# Altium footprint library Regulator$.PcbLib: 106 footprints (part 3 of 7)
Each footprint in its own frame and in the unit in brackets; x right, y up, seen from the top. Pads: shape width x height; smd on the part's side, far side on the other; paste and mask are expansions set on the pad; w line width, h text height; cw(c..) or ccw(c..) is an arc to the next point about the centre after c.
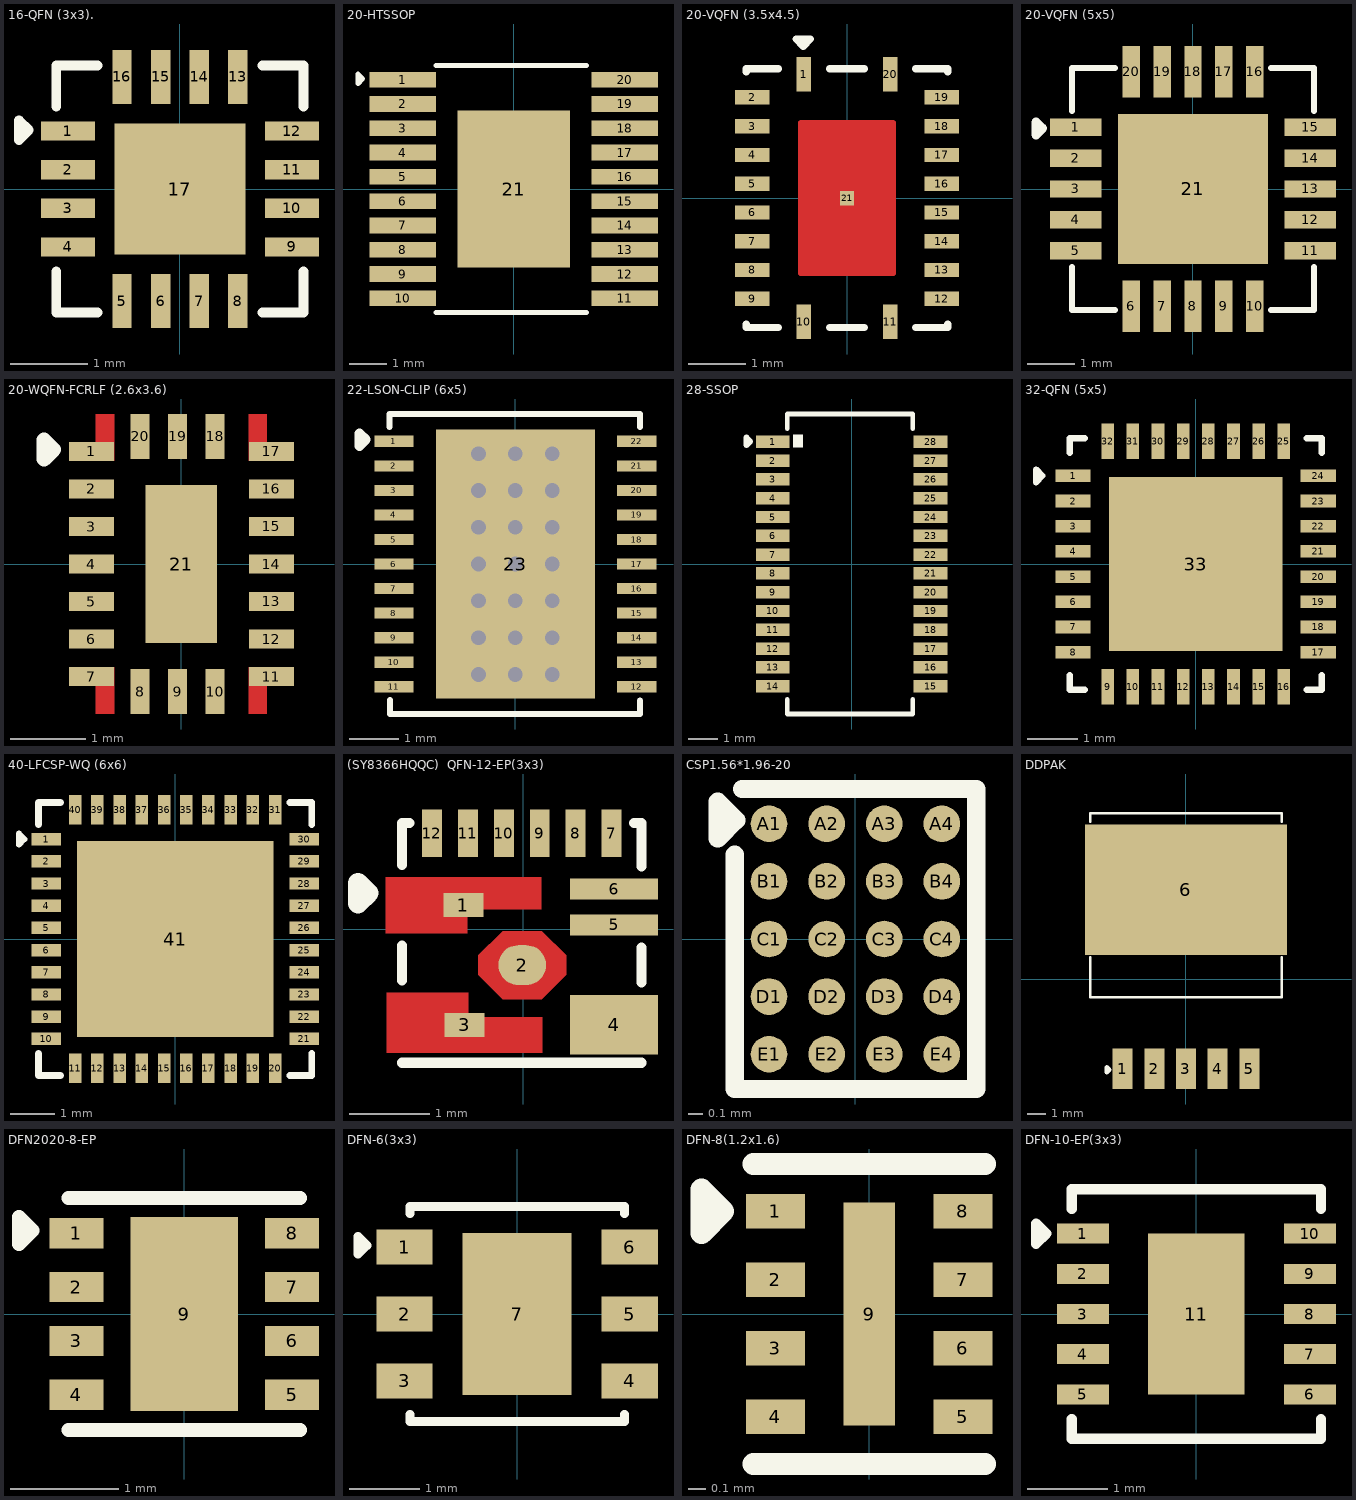
[diagram p2: the footprints below, top view; thin cyan lines are the x and y axes]

## 16-QFN (3x3). [mm]
pads (17):
  rect 0.7x0.25 smd: 1(-1.45,0.75) 2(-1.45,0.25) 3(-1.45,-0.25) 4(-1.45,-0.75) 9(1.45,-0.75) 10(1.45,-0.25) 11(1.45,0.25) 12(1.45,0.75)
  rect 0.25x0.7 smd: 5(-0.75,-1.45) 6(-0.25,-1.45) 7(0.25,-1.45) 8(0.75,-1.45) 13(0.75,1.45) 14(0.25,1.45) 15(-0.25,1.45) 16(-0.75,1.45)
  rect 1.7x1.7 smd: 17(0,0)
Top Overlay:
  lines w0.127: -1.6,-1.067 -1.6,-1.6 -1.067,-1.6 ; -1.6,1.067 -1.6,1.6 -1.067,1.6 ; 1.067,-1.6 1.6,-1.6 1.6,-1.067 ; 1.067,1.6 1.6,1.6 1.6,1.067 ; -2.083,0.635 -1.956,0.762 -2.083,0.889 -2.083,0.635
3D body "QFN-16_3X3_MNS.step": height 0.99, standoff 0, extent -1.549,-1.549 1.549,1.549

## 20-HTSSOP [mm]
pads (21):
  rect 1.78x0.42 smd: 1(-2.97,2.925) 2(-2.97,2.275) 3(-2.97,1.625) 4(-2.97,0.975) 5(-2.97,0.325) 6(-2.97,-0.325) 7(-2.97,-0.975) 8(-2.97,-1.625) 9(-2.97,-2.275) 10(-2.97,-2.925) 11(2.97,-2.925) 12(2.97,-2.275) 13(2.97,-1.625) 14(2.97,-0.975) 15(2.97,-0.325) 16(2.97,0.325) 17(2.97,0.975) 18(2.97,1.625) 19(2.97,2.275) 20(2.97,2.925)
  rect 3x4.2 smd: 21(0,0)
Top Overlay:
  lines w0.127: -2.083,-3.302 1.956,-3.302 ; -2.083,3.302 1.956,3.302 ; -4.166,2.819 -4.166,3.073 -4.039,2.946 -4.166,2.819
3D body "LM25118Q1MHX_NOPB.STEP": height 1.1, standoff 0, extent -3.2,-3.25 3.2,3.25

## 20-VQFN (3.5x4.5) [mm]
pads (21):
  rect 0.25x0.6 smd: 1(-0.75,2.15) 10(-0.75,-2.15) 11(0.75,-2.15) 20(0.75,2.15)
  rect 0.6x0.25 smd: 2(-1.65,1.75) 3(-1.65,1.25) 4(-1.65,0.75) 5(-1.65,0.25) 6(-1.65,-0.25) 7(-1.65,-0.75) 8(-1.65,-1.25) 9(-1.65,-1.75) 12(1.65,-1.75) 13(1.65,-1.25) 14(1.65,-0.75) 15(1.65,-0.25) 16(1.65,0.25) 17(1.65,0.75) 18(1.65,1.25) 19(1.65,1.75)
  rect 0.25x0.25 smd paste-1 mask+0: 21(0,0)
Top Layer:
  region: 0.808,1.349 0.81,1.349 0.813,1.348 0.815,1.348 0.818,1.347 0.82,1.346 0.823,1.345 0.825,1.343 0.827,1.342 0.829,1.34 0.831,1.339 0.833,1.337 0.835,1.335 0.837,1.333 0.839,1.331 0.84,1.329 0.842,1.327 0.843,1.325 0.845,1.323 0.846,1.32 0.847,1.318 0.848,1.315 0.848,1.313 0.849,1.31 0.849,1.308 0.85,1.305 0.85,1.303 0.85,1.3 0.85,-1.3 0.85,-1.303 0.85,-1.305 0.849,-1.308 0.849,-1.31 0.848,-1.313 0.848,-1.315 0.847,-1.318 0.846,-1.32 0.845,-1.323 0.843,-1.325 0.842,-1.327 0.84,-1.329 0.839,-1.331 0.837,-1.333 0.835,-1.335 0.833,-1.337 0.831,-1.339 0.829,-1.34 0.827,-1.342 0.825,-1.343 0.823,-1.345 0.82,-1.346 0.818,-1.347 0.815,-1.348 0.813,-1.348 0.81,-1.349 0.808,-1.349 0.805,-1.35 -0.805,-1.35 -0.808,-1.349 -0.81,-1.349 -0.813,-1.348 -0.815,-1.348 -0.818,-1.347 -0.82,-1.346 -0.823,-1.345 -0.825,-1.343 -0.827,-1.342 -0.829,-1.34 -0.831,-1.339 -0.833,-1.337 -0.835,-1.335 -0.837,-1.333 -0.839,-1.331 -0.84,-1.329 -0.842,-1.327 -0.843,-1.325 -0.845,-1.323 -0.846,-1.32 -0.847,-1.318 -0.848,-1.315 -0.848,-1.313 -0.849,-1.31 -0.849,-1.308 -0.85,-1.305 -0.85,-1.303 -0.85,-1.3 -0.85,1.3 -0.85,1.303 -0.85,1.305 -0.849,1.308 -0.849,1.31 -0.848,1.313 -0.848,1.315 -0.847,1.318 -0.846,1.32 -0.845,1.323 -0.843,1.325 -0.842,1.327 -0.84,1.329 -0.839,1.331 -0.837,1.333 -0.835,1.335 -0.833,1.337 -0.831,1.339 -0.829,1.34 -0.827,1.342 -0.825,1.343 -0.823,1.345 -0.82,1.346 -0.818,1.347 -0.815,1.348 -0.813,1.348 -0.81,1.349 -0.808,1.349 -0.805,1.35 0.805,1.35
Top Overlay:
  lines w0.127: -1.75,-2.195 -1.75,-2.25 -1.195,-2.25 ; -1.75,2.195 -1.75,2.25 -1.195,2.25 ; -0.305,-2.25 0.305,-2.25 ; -0.305,2.25 0.305,2.25 ; 1.195,-2.25 1.75,-2.25 1.75,-2.195 ; 1.195,2.25 1.75,2.25 1.75,2.195 ; -0.888,2.766 -0.634,2.766 -0.761,2.639 -0.888,2.766
3D body "step_temp.STEP": height 1, standoff 0, extent -1.75,-2.25 1.75,2.25

## 20-VQFN (5x5) [mm]
pads (21):
  rect 1.087x0.364 smd paste-100 mask+0.051: 1(-2.468,1.3) 2(-2.468,0.65) 3(-2.468,0) 4(-2.468,-0.65) 5(-2.468,-1.3) 11(2.468,-1.3) 12(2.468,-0.65) 13(2.468,0) 14(2.468,0.65) 15(2.468,1.3)
  rect 0.364x1.087 smd paste-100 mask+0.051: 6(-1.3,-2.468) 7(-0.65,-2.468) 8(0,-2.468) 9(0.65,-2.468) 10(1.3,-2.468) 16(1.3,2.468) 17(0.65,2.468) 18(0,2.468) 19(-0.65,2.468) 20(-1.3,2.468)
  rect 3.15x3.15 smd paste-100 mask+0.051: 21(0,0)
Top Overlay:
  lines w0.127: -2.551,-1.647 -2.551,-2.551 -1.647,-2.551 ; -2.551,1.647 -2.551,2.551 -1.647,2.551 ; 1.647,-2.551 2.551,-2.551 2.551,-1.647 ; 1.647,2.551 2.551,2.551 2.551,1.647
  lines w0.2: -3.307,1.148 -3.307,1.402 -3.18,1.275 -3.307,1.148
Top Paste:
  drawing of 21 lines, arcs and shapes, not listed
3D body "TPS74801RGWR.step": height 1, standoff 0, extent -2.5,-2.5 2.5,2.5

## 20-WQFN-FCRLF (2.6x3.6) [mm]
pads (21):
  rect 0.6x0.25 smd paste-100 mask+0.051: 1(-1.2,1.5) 2(-1.2,1) 3(-1.2,0.5) 4(-1.2,0) 5(-1.2,-0.5) 6(-1.2,-1) 7(-1.2,-1.5) 11(1.2,-1.5) 12(1.2,-1) 13(1.2,-0.5) 14(1.2,0) 15(1.2,0.5) 16(1.2,1) 17(1.2,1.5)
  rect 0.25x0.6 smd paste-100 mask+0.051: 8(-0.55,-1.7) 9(-0.05,-1.7) 10(0.45,-1.7) 18(0.45,1.7) 19(-0.05,1.7) 20(-0.55,1.7)
  rect 0.95x2.1 smd paste-100 mask+0.051: 21(0,0)
Top Layer:
  region: 1.143,-1.375 0.893,-1.375 0.893,-2 1.143,-2
  rectangle: -1.143,-2 -0.893,-1.375
  region: 1.143,2 0.893,2 0.893,1.375 1.143,1.375
  rectangle: -1.143,1.375 -0.893,2
Top Overlay:
  lines w0.2: -1.829,1.397 -1.829,1.651 -1.702,1.524 -1.829,1.397

## 22-LSON-CLIP (6x5) [mm]
pads (44):
  rect 0.8x0.23 smd: 1(-2.475,2.5) 2(-2.475,2) 3(-2.475,1.5) 4(-2.475,1) 5(-2.475,0.5) 6(-2.475,0) 7(-2.475,-0.5) 8(-2.475,-1) 9(-2.475,-1.5) 10(-2.475,-2) 11(-2.475,-2.5) 12(2.475,-2.5) 13(2.475,-2) 14(2.475,-1.5) 15(2.475,-1) 16(2.475,-0.5) 17(2.475,0) 18(2.475,0.5) 19(2.475,1) 20(2.475,1.5) 21(2.475,2) 22(2.475,2.5)
  rect 3.24x5.48 smd: 23(0,0)
  round 0.6 hole 0.3: ""(-0.75,-2.25) ""(-0.75,-1.5) ""(-0.75,-0.75) ""(-0.75,0) ""(-0.75,0.75) ""(-0.75,1.5) ""(-0.75,2.25) ""(0,-2.25) ""(0,-1.5) ""(0,-0.75) ""(0,0) ""(0,0.75) ""(0,1.5) ""(0,2.25) ""(0.75,-2.25) ""(0.75,-1.5) ""(0.75,-0.75) ""(0.75,0) ""(0.75,0.75) ""(0.75,1.5) ""(0.75,2.25)
Top Overlay:
  lines w0.127: -2.563,2.798 -2.563,3.058 2.54,3.058 2.54,2.794 ; -2.555,-2.776 -2.555,-3.057 2.541,-3.057 2.541,-2.786
  lines w0.2: -3.175,2.408 -3.175,2.662 -3.048,2.535 -3.175,2.408
3D body "TPS53319DQPR.STEP": height 1.5, standoff 0, extent -2.5,-3 2.5,3

## 28-SSOP [mil]
pads (28):
  rect 45x16.5 smd: 1(-105,162.5) 2(-105,137.5) 3(-105,112.5) 4(-105,87.5) 5(-105,62.5) 6(-105,37.5) 7(-105,12.5) 8(-105,-12.5) 9(-105,-37.5) 10(-105,-62.5) 11(-105,-87.5) 12(-105,-112.5) 13(-105,-137.5) 14(-105,-162.5) 15(105,-162.5) 16(105,-137.5) 17(105,-112.5) 18(105,-87.5) 19(105,-62.5) 20(105,-37.5) 21(105,-12.5) 22(105,12.5) 23(105,37.5) 24(105,62.5) 25(105,87.5) 26(105,112.5) 27(105,137.5) 28(105,162.5)
Top Overlay:
  rectangle: -78,155 -65,172
  lines w6: -85.5,-179.6 -85.5,-199.5 81.5,-199.5 81.5,-179.6 ; -85.5,179.6 -85.5,199.5 81.5,199.5 81.5,179.6
  lines w7.87: -140,158 -135,163 -140,168 -140,158
3D body "SSOP-28_GN_LIT.step": height 67.09, standoff 0, extent -122.01,-196.5 122.01,196.5

## 32-QFN (5x5) [mm]
pads (33):
  rect 0.7x0.25 smd: 1(-2.435,1.75) 2(-2.435,1.25) 3(-2.435,0.75) 4(-2.435,0.25) 5(-2.435,-0.25) 6(-2.435,-0.75) 7(-2.435,-1.25) 8(-2.435,-1.75) 17(2.435,-1.75) 18(2.435,-1.25) 19(2.435,-0.75) 20(2.435,-0.25) 21(2.435,0.25) 22(2.435,0.75) 23(2.435,1.25) 24(2.435,1.75)
  rect 0.25x0.7 smd: 9(-1.75,-2.435) 10(-1.25,-2.435) 11(-0.75,-2.435) 12(-0.25,-2.435) 13(0.25,-2.435) 14(0.75,-2.435) 15(1.25,-2.435) 16(1.75,-2.435) 25(1.75,2.435) 26(1.25,2.435) 27(0.75,2.435) 28(0.25,2.435) 29(-0.25,2.435) 30(-0.75,2.435) 31(-1.25,2.435) 32(-1.75,2.435)
  rect 3.45x3.45 smd paste-3: 33(0,0)
Top Overlay:
  lines w0.127: -2.5,-2.205 -2.5,-2.5 -2.205,-2.5 ; -2.5,2.205 -2.5,2.5 -2.205,2.5 ; 2.205,-2.5 2.5,-2.5 2.5,-2.205 ; 2.205,2.5 2.5,2.5 2.5,2.205 ; -3.172,1.623 -3.172,1.877 -3.045,1.75 -3.172,1.623
3D body "TCA6424ARGJR.step": height 0.6, standoff 0, extent -2.5,-2.5 2.5,2.5

## 40-LFCSP-WQ (6x6) [mm]
pads (41):
  rect 0.665x0.28 smd paste-100 mask+0.051: 1(-2.908,2.25) 2(-2.908,1.75) 3(-2.908,1.25) 4(-2.908,0.75) 5(-2.908,0.25) 6(-2.908,-0.25) 7(-2.908,-0.75) 8(-2.908,-1.25) 9(-2.908,-1.75) 10(-2.908,-2.25) 21(2.908,-2.25) 22(2.908,-1.75) 23(2.908,-1.25) 24(2.908,-0.75) 25(2.908,-0.25) 26(2.908,0.25) 27(2.908,0.75) 28(2.908,1.25) 29(2.908,1.75) 30(2.908,2.25)
  rect 0.28x0.665 smd paste-100 mask+0.051: 11(-2.25,-2.908) 12(-1.75,-2.908) 13(-1.25,-2.908) 14(-0.75,-2.908) 15(-0.25,-2.908) 16(0.25,-2.908) 17(0.75,-2.908) 18(1.25,-2.908) 19(1.75,-2.908) 20(2.25,-2.908) 31(2.25,2.908) 32(1.75,2.908) 33(1.25,2.908) 34(0.75,2.908) 35(0.25,2.908) 36(-0.25,2.908) 37(-0.75,2.908) 38(-1.25,2.908) 39(-1.75,2.908) 40(-2.25,2.908)
  rect 4.42x4.42 smd paste-100 mask+0.051: 41(0,0)
Top Overlay:
  lines w0.127: -3.517,2.123 -3.517,2.377 -3.39,2.25 -3.517,2.123
  lines w0.152: -3.076,-2.58 -3.076,-3.076 -2.58,-3.076 ; -3.076,2.58 -3.076,3.076 -2.58,3.076 ; 2.58,-3.076 3.076,-3.076 3.076,-2.58 ; 2.58,3.076 3.076,3.076 3.076,2.58
Top Paste:
  drawing of 41 lines, arcs and shapes, not listed
3D body "C578974.step": height 0.82, standoff 0, extent -3.01,-3.01 3.01,3.01

## (SY8366HQQC)  QFN-12-EP(3x3) [mm]
pads (12):
  rect 0.5x0.3 smd: 1(-0.746,0.299) 3(-0.732,-1.201)
  oval 0.6x0.5 smd: 2(-0.01,-0.45)
  rect 1.1x0.75 smd paste-100 mask+0.05: 4(1.14,-1.198)
  rect 1.1x0.26 smd paste-100 mask+0.05: 5(1.14,0.052) 6(1.14,0.502)
  rect 0.25x0.6 smd paste-100 mask+0.05: 7(1.109,1.201) 8(0.66,1.201) 9(0.21,1.201) 10(-0.241,1.201) 11(-0.69,1.201) 12(-1.14,1.201)
Top Layer:
  region: -0.256,-0.025 0.235,-0.025 0.54,-0.33 0.54,-0.571 0.235,-0.875 -0.254,-0.875 -0.56,-0.57 -0.56,-0.33 -0.267,-0.038
  region: -1.706,-1.551 0.243,-1.551 0.243,-1.103 -0.685,-1.103 -0.685,-0.8 -1.707,-0.8 -1.707,-1.15
  region: -1.72,0.65 0.229,0.65 0.229,0.251 -0.699,0.251 -0.699,-0.051 -1.721,-0.051 -1.721,0.249
Top Overlay:
  lines w0.127: -1.515,-1.673 1.485,-1.673 ; -1.515,-0.645 -1.515,-0.206 ; -1.515,0.804 -1.515,1.327 -1.42,1.327 ; 1.389,1.327 1.485,1.327 1.485,0.786 ; 1.485,-0.669 1.485,-0.232
  lines w0.254: -2.067,0.325 -2.067,0.579 -1.94,0.452 -2.067,0.325
3D body "QFN-12 EP.step": height 0.78, standoff 0, extent -1.525,-1.673 1.495,1.337

## CSP1.56*1.96-20 [mil]
pads (20):
  round 10 smd mask+2.17: A1(-23.62,31.5) A2(-7.87,31.5) A3(7.87,31.5) A4(23.62,31.5) B1(-23.62,15.75) B2(-7.87,15.75) B3(7.87,15.75) B4(23.62,15.75) C1(-23.62,0) C2(-7.87,0) C3(7.87,0) C4(23.62,0) D1(-23.62,-15.75) D2(-7.87,-15.75) D3(7.87,-15.75) D4(23.62,-15.75) E1(-23.62,-31.5) E2(-7.87,-31.5) E3(7.87,-31.5) E4(23.62,-31.5)
Top Overlay:
  lines w5: -33,23 -33,-41 33,-41 33,41 -31,41 ; -37.62,27.5 -32.62,32.5 -37.62,37.5 -37.62,27.5
3D body "SYR838PKC.stp": height 25.98, standoff 0, extent -30.71,-38.58 30.71,38.58

## DDPAK [mm]
pads (6):
  rect 1.07x2.16 smd mask+0.05: 1(-3.4,-4.797) 2(-1.7,-4.797) 3(0,-4.797) 4(1.7,-4.797) 5(3.4,-4.797)
  rect 10.8x6.99 smd mask+0.05: 6(0,4.798)
Top Overlay:
  lines w0.127: -5.131,1.194 -5.131,-0.965 5.131,-0.965 5.131,1.194 ; -5.131,8.433 -5.131,8.89 5.131,8.89 ; 5.131,8.433 5.131,8.89 ; 5.131,8.89 5.131,8.89
  lines w0.254: -4.242,-4.978 -4.115,-4.851 -4.242,-4.724 -4.242,-4.978
3D body "NOPB.STEP": height 4.75, standoff -0.05, extent -5.08,-5.524 5.08,8.826

## DFN2020-8-EP [mm]
pads (9):
  rect 0.5x0.28 smd paste+0 mask+0.051: 1(-1,0.75) 2(-1,0.25) 3(-1,-0.25) 4(-1,-0.75) 5(1,-0.75) 6(1,-0.25) 7(1,0.25) 8(1,0.75)
  rect 1x1.8 smd paste+0 mask+0.051: 9(0,0)
Top Overlay:
  lines w0.127: -1.076,-1.076 1.076,-1.076 ; -1.076,1.076 1.076,1.076 ; -1.533,0.648 -1.406,0.775 -1.533,0.902 -1.533,0.648
3D body "C2070918.step": height 0.6, standoff 0, extent -1.01,-1.005 1.01,1.005

## DFN-6(3x3) [mm]
pads (7):
  rect 0.8x0.5 smd paste+0 mask+0.051: 1(-1.6,0.95) 2(-1.6,0) 3(-1.6,-0.95) 4(1.6,-0.95) 5(1.6,0) 6(1.6,0.95)
  rect 1.55x2.3 smd paste+0 mask+0.051: 7(0,0)
Top Overlay:
  lines w0.127: -1.524,-1.426 -1.524,-1.524 1.524,-1.524 1.524,-1.426 ; -1.524,1.426 -1.524,1.524 0.381,1.524 ; 0.254,1.524 1.524,1.524 1.524,1.426 ; -2.26,0.848 -2.26,1.102 -2.133,0.975 -2.26,0.848
3D body "ST1L05APU33R.step": height 1.04, standoff 0.04, extent -1.5,-1.5 1.5,1.5

## DFN-8(1.2x1.6) [mm]
pads (9):
  rect 0.345x0.2 smd paste+0 mask+0.051: 1(-0.547,0.6) 2(-0.547,0.2) 3(-0.547,-0.2) 4(-0.547,-0.6) 5(0.547,-0.6) 6(0.547,-0.2) 7(0.547,0.2) 8(0.547,0.6)
  rect 0.3x1.3 smd paste+0 mask+0.051: 9(0,0)
Top Overlay:
  lines w0.127: -0.676,-0.876 0.676,-0.876 ; -0.676,0.876 0.676,0.876 ; -0.979,0.473 -0.979,0.727 -0.852,0.6 -0.979,0.473
3D body "C2969937.step": height 0.4, standoff 0, extent -0.61,-0.81 0.61,0.81

## DFN-10-EP(3x3) [mm]
pads (11):
  rect 0.65x0.25 smd paste+0 mask+0.051: 1(-1.411,1) 2(-1.411,0.5) 3(-1.411,0) 4(-1.411,-0.5) 5(-1.411,-1) 6(1.411,-1) 7(1.411,-0.5) 8(1.411,0) 9(1.411,0.5) 10(1.411,1)
  rect 1.2x2 smd paste+0 mask+0.051: 11(0,0)
Top Overlay:
  lines w0.127: -1.551,-1.305 -1.551,-1.551 1.551,-1.551 1.551,-1.305 ; -1.551,1.305 -1.551,1.551 1.551,1.551 1.551,1.305 ; -1.996,0.873 -1.869,1 -1.996,1.127 -1.996,0.873
3D body "SY7203DBC.step": height 0.91, standoff 0, extent -1.5,-1.49 1.5,1.49